# Altium integrated library GCM188R71E105KA64J.IntLib: 1 symbol
Pins are listed as number, name and electrical type; pins without a type are passive.

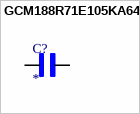
[diagram p0: symbol GCM188R71E105KA64J]

## GCM188R71E105KA64J
designator C?
1 ÂµF Â±10% 25V Ceramic Capacitor X7R 0603 (1608 Metric); MF: Murata; MP: GCM188R71E105KA64J; SnapEDA_Link: https://www.snapeda.com/parts/GCM188R71E105KA64J/Murata/view-part/?ref=snap; Package: 1608-2 MURATA; Value: *; Check_prices: https://www.snapeda.com/parts/GCM188R71E105KA64J/Murata/view-part/?ref=eda
footprint CAPC1608X90N
pins: 1, 2